# Altium schematic symbol library Conn,Header,2x6 Pin,Top,1.27mm,Shroud.Schlib: 1 symbol
Pins are listed as number, name and electrical type; pins without a type are passive.

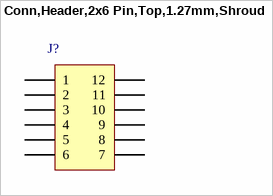
[diagram p0: symbol Conn,Header,2x6 Pin,Top,1.27mm,Shroud]

## Conn,Header,2x6 Pin,Top,1.27mm,Shroud
designator J?
pins: 1, 2, 3 (power), 4 (power), 5 (power), 6 (power), 7 (power), 8 (power), 9 (power), 10 (power), 11 (power), 12 (power)